# Altium footprint library Propia.PcbLib: 378 footprints (part 11 of 24)
Each footprint in its own frame and in the unit in brackets; x right, y up, seen from the top. Pads: shape width x height; smd on the part's side, far side on the other; paste and mask are expansions set on the pad; w line width, h text height; cw(c..) or ccw(c..) is an arc to the next point about the centre after c.
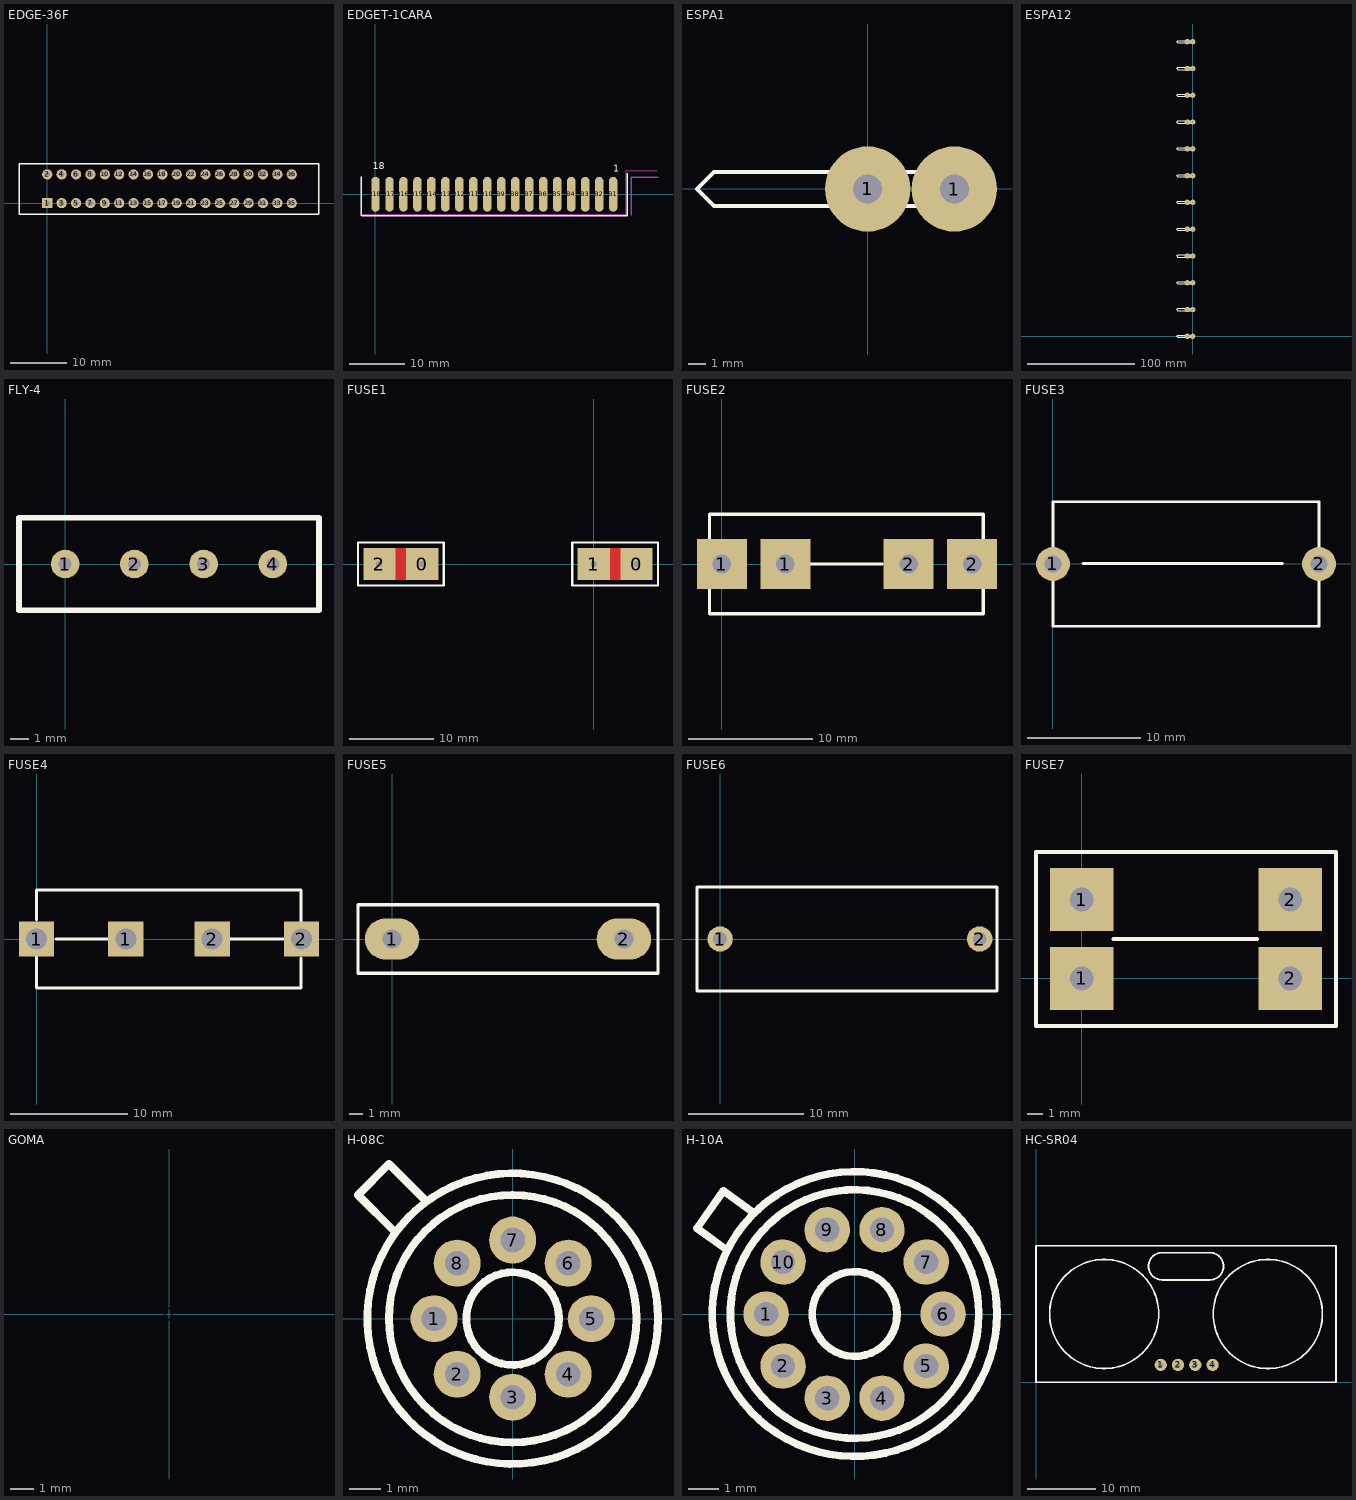
[diagram p10: the footprints below, top view; thin cyan lines are the x and y axes]

## EDGE-36F [mm]
pads (36):
  rect 1.8x1.8 hole 1: 1(0,0)
  round 1.8 hole 1: 2(0,5.08) 3(2.54,0) 4(2.54,5.08) 5(5.08,0) 6(5.08,5.08) 7(7.62,0) 8(7.62,5.08) 9(10.16,0) 10(10.16,5.08) 11(12.7,0) 12(12.7,5.08) 13(15.24,0) 14(15.24,5.08) 15(17.78,0) 16(17.78,5.08) 17(20.32,0) 18(20.32,5.08) 19(22.86,0) 20(22.86,5.08) 21(25.4,0) 22(25.4,5.08) 23(27.94,0) 24(27.94,5.08) 25(30.48,0) 26(30.48,5.08) 27(33.02,0) 28(33.02,5.08) 29(35.56,0) 30(35.56,5.08) 31(38.1,0) 32(38.1,5.08) 33(40.64,0) 34(40.64,5.08) 35(43.18,0) 36(43.18,5.08)
TopOverlay:
  lines w0.254: -5,-2 -5,7 48,7 48,-2 -5,-2

## EDGET-1CARA [mil]
pads (18):
  oval 60x250 smd: B1(1700,0) B2(1600,0) B3(1500,0) B4(1400,0) B5(1300,0) B6(1200,0) B7(1100,0) B8(1000,0) B9(900,0) B10(800,0) B11(700,0) B12(600,0) B13(500,0) B14(400,0) B15(300,0) B16(200,0) B17(100,0) B18(0,0)
TopOverlay:
  lines w10: -101.1,123.86 -100.39,-152.01 ; -98.39,-154.02 -53.66,-154.02 ; -66.85,-154.02 1770.67,-154.02 1800.75,-154.02 1800.98,-154.25 1800.98,-123.98 1801.1,-123.86 1800.39,152.01
  text "18" at -20,180 h50
  text "1" at 1700,160 h50
BottomOverlay:
  text "D18" at 100,180 h50
  text "D1" at 1720,160 h50
TopSolder:
  rectangle: -100.39,-154.33 1834.65,141.34
  lines w62.99: 1829.53,-150 1829.53,120.47 2020.47,120.47
BottomSolder:
  rectangle: -100.39,-154.33 1834.65,141.34
  lines w62.99: 1829.53,-150 1829.53,120.47 2020.47,120.47
KeepOutLayer:
  lines w10: -88.43,-146.69 1791.57,-146.69 ; 1790,-140 1790,170 1960,170 2010,170
Mechanical1:
  lines w10: 1829.53,-150 1829.53,120.47 2020.47,120.47
Mechanical4:
  lines w10: -100,-150 1800,-150

## ESPA1 [mm]
pads (2):
  round 5 hole 1.7: 1(0,0) 1(5.08,0)
TopOverlay:
  circle w0.254: c5.08,0 r1.02
  circle w0.254: c0,0 r1.005
  lines w0.254: -10,0 -9,1 7,1 7,-1 -9,-1 -10,0

## ESPA12 [mm]
pads (24):
  round 5 hole 1.7: 1(-5,0) 1(0,0) 2(-5.08,25) 2(0,25) 3(-5.08,50) 3(0,50) 4(-5.08,75) 4(0,75) 5(-5.08,100) 5(0,100) 6(-5.08,125) 6(0,125) 7(-5.08,150) 7(0,150) 8(-5.08,175) 8(0,175) 9(-5.08,200) 9(0,200) 10(-5.08,225) 10(0,225) 11(-5.08,250) 11(0,250) 12(-5.08,275) 12(0,275)
TopOverlay:
  drawing of 196 lines, arcs and shapes, not listed

## FLY-4 [mil]
pads (4):
  round 62 hole 28: 1(0,0) 2(150,0) 3(300,0) 4(450,0)
TopOverlay:
  lines w12: -100,-100 550,-100 550,100 -100,100 -100,-100

## FUSE1 [mil]
pads (4):
  rect 150x150 hole 30: 0(-800,0) 0(200,0) 1(0,0) 2(-1000,0)
TopLayer:
  rectangle: -950,-75 -850,75
  rectangle: 50,-75 150,75
BottomLayer:
  rectangle: -950,-75 -850,75
  rectangle: 50,-75 150,75
TopOverlay:
  lines w10: -1100,-100 -700,-100 -700,100 -1100,100 -1100,-100 ; -100,-100 300,-100 300,100 -100,100 -100,-100

## FUSE2 [mm]
pads (4):
  rect 4x4 hole 1.5: 1(0,0) 1(5.1,0) 2(15,0) 2(20.1,0)
TopOverlay:
  lines w0.254: 7.1,0 12.9,0 ; -1,-4 -1,4 21,4 21,-4 -1,-4

## FUSE3 [mm]
pads (2):
  round 3 hole 1.5: 1(0,0) 2(23.5,0)
TopOverlay:
  lines w0.254: 2.66,0.03 20.28,0.03 ; 0,-5.5 23.5,-5.5 23.5,5.5 0,5.5 0,-5.5

## FUSE4 [mm]
pads (4):
  rect 3x3 hole 1.8: 1(0,0) 1(7.62,0) 2(15,0) 2(22.62,0)
TopOverlay:
  lines w0.254: 0,-1.5 0,-4.2 22.6,-4.2 22.6,-1.62 ; 0,1.61 0,4.2 22.6,4.2 22.6,1.5 ; 1.65,0 6.07,0 ; 16.56,0 21.03,0

## FUSE5 [mm]
pads (2):
  oval 4x3 hole 1.4: 1(0,0) 2(17,0)
TopOverlay:
  lines w0.254: -2.5,-2.5 19.5,-2.5 19.5,2.5 -2.5,2.5 -2.5,-2.5

## FUSE6 [mm]
pads (2):
  round 2.2 hole 1.2: 1(0,0) 2(22.5,0)
TopOverlay:
  lines w0.254: -2,-4.5 -2,4.5 24,4.5 24,-4.5 -2,-4.5

## FUSE7 [mm]
pads (4):
  rect 4x4 hole 1.5: 1(0,0) 1(0,5) 2(13.2,0) 2(13.2,5)
TopOverlay:
  lines w0.254: 2,2.5 11.1,2.5 ; -2.9,-3 -2.9,8 16.1,8 16.1,-3 -2.9,-3

## GOMA [mm]
pads (1):
  round 12.6 on Bottom Solder: 0(0,0)

## H-08C [mm]
pads (8):
  round 1.524 hole 0.8: 1(-2.54,0) 2(-1.795,-1.795) 3(0,-2.54) 4(1.795,-1.795) 5(2.54,0) 6(1.795,1.795) 7(0,2.54) 8(-1.795,1.795)
TopOverlay:
  circle w0.254: c0,0 r4
  circle w0.254: c0,0 r1.5
  circle w0.254: c0,0 r4.7
  lines w0.254: -4,5 -2.82,3.82 -2.82,3.81 ; -3.989,4.989 -4.011,4.989 -5,4 -3.81,2.81 -3.81,2.79 ; -3.505,4.495 -3.495,4.495

## H-10A [mm]
pads (11):
  round 1.5 hole 0.8: 1(-2.92,0) 2(-2.362,-1.716) 3(-0.902,-2.777) 4(0.902,-2.777) 5(2.362,-1.716) 6(2.92,0) 6(2.92,0) 7(2.362,1.716) 8(0.902,2.777) 9(-0.902,2.777) 10(-2.362,1.716)
TopOverlay:
  circle w0.254: c0,0 r1.4
  circle w0.254: c0,0 r4.1
  circle w0.254: c0,0 r4.7
  lines w0.254: -4.33,4.06 -5.202,2.826 -4.24,2.13 ; -4.29,4.04 -3.31,3.33

## HC-SR04 [mm]
pads (4):
  round 1.8 hole 0.762: 1(18.288,2.54) 2(20.828,2.54) 3(23.368,2.54) 4(25.908,2.54)
TopOverlay:
  circle w0.254: c10,10 r8
  circle w0.254: c34,10 r8
  lines w0.254: 0,0 44,0 44,20 0,20 0,0 ; 16.5,17 ccw(c18.5,17) 18.5,15 25.5,15 ccw(c25.5,17) 27.5,17 ccw(c25.5,17) 25.5,19 18.5,19 ccw(c18.5,17) 16.5,17